# EAGLE library part FE1.1S (library FE1.1S)
Check availability <https://pricing.snapeda.com/parts/FE1.1S/terminus/view-part?ref=eda>
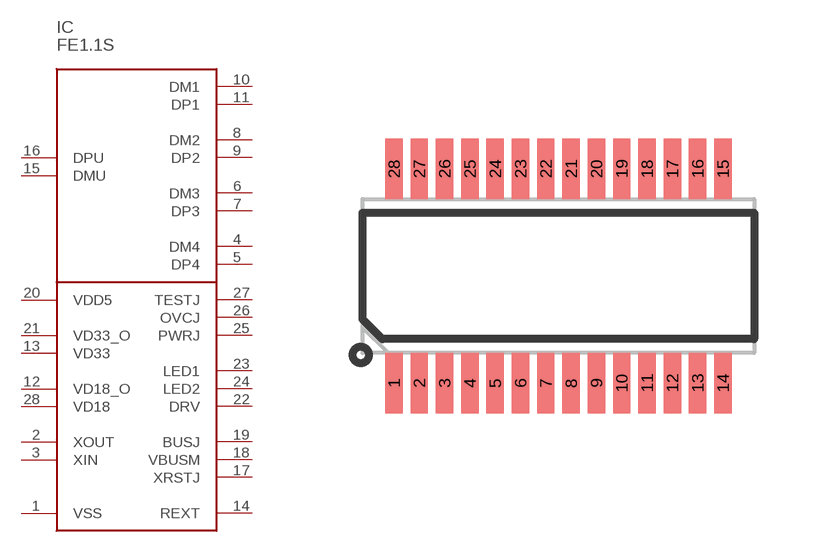
[diagram p0: symbol with the pads of SOP64P600X175-28N; footprint SOP64P600X175-28N]

Designator prefix IC

## FE1.1S (Availability: In Stock; Check_prices: https://www.snapeda.com/parts/FE1.1S/Terminus/view-part/?ref=eda; Description: USB 2.0 HIGH SPEED 4-PORT HUB CONTROLLER; MF: terminus; MP: FE1.1S; Package: None; Price: None; SnapEDA_Link: https://www.snapeda.com/parts/FE1.1S/Terminus/view-part/?ref=snap)  [SOP64P600X175-28N]
1  VSS
2  XOUT
3  XIN
4  DM4
5  DP4
6  DM3
7  DP3
8  DM2
9  DP2
10  DM1
11  DP1
12  VD18_O
13  VD33
14  REXT
15  DMU
16  DPU
17  XRSTJ
18  VBUSM
19  BUSJ
20  VDD5
21  VD33_O
22  DRV
23  LED1
24  LED2
25  PWRJ
26  OVCJ
27  TESTJ
28  VD18

## Footprint SOP64P600X175-28N (pad centres in mm)
FE1.1S
smd 0.44 x 1.525: 1 -4.16,-2.712; 2 -3.52,-2.712; 3 -2.88,-2.712; 4 -2.24,-2.712; 5 -1.6,-2.712; 6 -0.96,-2.712; 7 -0.32,-2.712; 8 0.32,-2.712; 9 0.96,-2.712; 10 1.6,-2.712; 11 2.24,-2.712; 12 2.88,-2.712; 13 3.52,-2.712; 14 4.16,-2.712; 15 4.16,2.712; 16 3.52,2.712; 17 2.88,2.712; 18 2.24,2.712; 19 1.6,2.712; 20 0.96,2.712; 21 0.32,2.712; 22 -0.32,2.712; 23 -0.96,2.712; 24 -1.6,2.712; 25 -2.24,2.712; 26 -2.88,2.712; 27 -3.52,2.712; 28 -4.16,2.712